# Altium schematic symbol library STM32WL_Sens_ADC_Bat.SCHLIB: 63 symbols
Pins are listed as number, name and electrical type; pins without a type are passive.

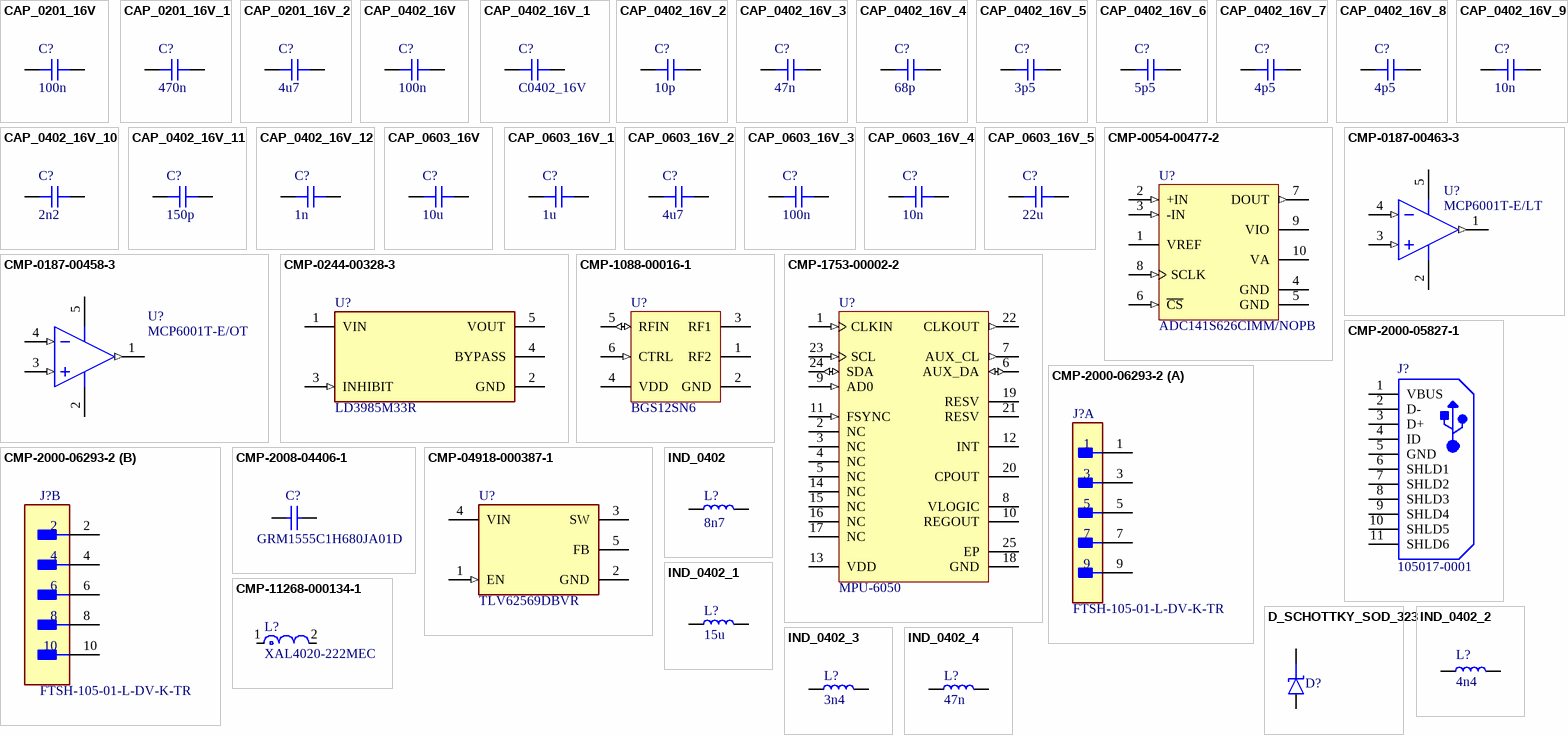
[diagram p0: symbols CAP_0201_16V to IND_0402_4]

## CAP_0201_16V
designator C?, comment 100n
Capacitor SMD 0201 16V
footprint CAP_0201
footprint CAP_0603
pins: 1, 2

## CAP_0201_16V_1
designator C?, comment 470n
Capacitor SMD 0201 16V
footprint CAP_0201
footprint CAP_0603
pins: 1, 2

## CAP_0201_16V_2
designator C?, comment 4u7
Capacitor SMD 0201 16V
footprint CAP_0201
footprint CAP_0603
pins: 1, 2

## CAP_0402_16V
designator C?, comment 100n
Capacitor SMD 0402 16V; Parameter 1: *; Parameter 2: *
footprint CAP_0402
footprint CAP_0603
pins: 1, 2

## CAP_0402_16V_1
designator C?, comment C0402_16V
Capacitor SMD 0402 16V
footprint CAP_0402
pins: 1, 2

## CAP_0402_16V_2
designator C?, comment 10p
Capacitor SMD 0402 16V
footprint CAP_0402
pins: 1, 2

## CAP_0402_16V_3
designator C?, comment 47n
Capacitor SMD 0402 16V
footprint CAP_0402
pins: 1, 2

## CAP_0402_16V_4
designator C?, comment 68p
Capacitor SMD 0402 16V
footprint CAP_0402
pins: 1, 2

## CAP_0402_16V_5
designator C?, comment 3p5
Capacitor SMD 0402 16V
footprint CAP_0402
pins: 1, 2

## CAP_0402_16V_6
designator C?, comment 5p5
Capacitor SMD 0402 16V
footprint CAP_0402
pins: 1, 2

## CAP_0402_16V_7
designator C?, comment 4p5
footprint CAP_0402
pins: 1, 2

## CAP_0402_16V_8
designator C?, comment 4p5
Capacitor SMD 0402 16V
footprint CAP_0402
pins: 1, 2

## CAP_0402_16V_9
designator C?, comment 10n
Capacitor SMD 0402 16V
footprint CAP_0402
pins: 1, 2

## CAP_0402_16V_10
designator C?, comment 2n2
Capacitor SMD 0402 16V
footprint CAP_0402
pins: 1, 2

## CAP_0402_16V_11
designator C?, comment 150p
Capacitor SMD 0402 16V
footprint CAP_0402
pins: 1, 2

## CAP_0402_16V_12
designator C?, comment 1n
Capacitor SMD 0402 16V
footprint CAP_0402
pins: 1, 2

## CAP_0603_16V
designator C?, comment 10u
Capacitor SMD 0603 16V
footprint CAP_0603
pins: 1, 2

## CAP_0603_16V_1
designator C?, comment 1u
Capacitor SMD 0603 16V
footprint CAP_0603
pins: 1, 2

## CAP_0603_16V_2
designator C?, comment 4u7
Capacitor SMD 0603 16V
footprint CAP_0603
pins: 1, 2

## CAP_0603_16V_3
designator C?, comment 100n
Capacitor SMD 0603 16V
footprint CAP_0603
pins: 1, 2

## CAP_0603_16V_4
designator C?, comment 10n
Capacitor SMD 0603 16V
footprint CAP_0603
pins: 1, 2

## CAP_0603_16V_5
designator C?, comment 22u
Capacitor SMD 0603 16V
footprint CAP_0603
pins: 1, 2

## CMP-0054-00477-2
designator U?, comment ADC141S626CIMM/NOPB
14-Bit, 50 kSPS to 250 kSPS, Differential Input, Micro Power A/D Converter, 10-pin Mini SOIC, Pb-Free; Manufacturer: National Semiconductor; CompType: ADC IC; PowerWise: Y; PackageTopMarking: ZXTT*X94C; DatasheetVersion: Jan-2009; PackageVersion: revB, Jul-2003; RoHS: Y; ComponentLink3Description: MUB10A Package Page; ComponentLink2URL: http://www.national.com/pf/AD/ADC141S626.html; Code_JEDEC: MO-187-BA; PackageReference: MUB10A; ComponentLink3URL: http://www.national.com/packaging/folders/mub10a.html; ComponentLink1URL: http://www.national.com/ds/AD/ADC141S626.pdf; PinCount: 10; RevisionNote: Component URLs added; PackageDescription: Mini-SO, Molded, .118 x .118 x .034in Body, 10 Lead, .0197in Pitch; ComponentLink1Description: ADC141S626 Datasheet; ComponentLink2Description: ADC141S626 Web Page
footprint MUB10A_M (TSSOP, 10-Leads, Body 3x3mm, Pitch 0.5mm, IPC Low Density)
footprint MUB10A_N (TSSOP, 10-Leads, Body 3x3mm, Pitch 0.5mm, IPC Medium Density)
footprint MUB10A_L (TSSOP, 10-Leads, Body 3x3mm, Pitch 0.5mm, IPC High Density)
pins: 1 VREF (power), 2 +IN (in), 3 -IN (in), 4 GND (power), 5 GND (power), 6 ~{CS} (in), 7 DOUT (out), 8 SCLK (in), 9 VIO (power), 10 VA (power)

## CMP-0187-00458-3
designator U?, comment MCP6001T-E/OT
None; Output Current: 23mA; Number of Circuits: 1; Input Offset Voltage-Max: 4.5mV; Nominal Supply Current: 100uA; Min Supply Voltage: 1.8V; Voltage: 6V; Operating Supply Voltage: 5.5V; Gain Bandwidth Product: 1MHz; Amplifier Type: GENERAL PURPOSE; Voltage Gain: 112dB; Slew Rate: 0.6V/µs; Power Supply Rejection Ratio (PSRR): 86dB; Input Bias Current: 1pA; Common Mode Rejection Ratio: 60dB; Package Quantity: 3000; Lead Free: Lead Free; Case/Package: SOT-23; Max Operating Temperature: 125°C; RoHS Compliant: Yes; Radiation Hardening: No; Number of Channels: 1; Length: 3.1mm; Height: 1.3mm; Output Current per Channel: 23mA; Supply Current: 100uA; Packaging: Tape and Reel; Technology: CMOS; Number of Elements: 1; Number of Pins: 5; Input Offset Voltage (Vos): 4.5mV; Width: 1.8mm; Contact Plating: Tin; Mount: Surface Mount; Slew Rate-Nom: 0.6V/µs; Unity Gain Bandwidth Product: 1MHz; REACH SVHC: No SVHC; Number of Amplifiers: 1; Max Supply Voltage: 6V; Operating Supply Current: 100uA; Min Operating Temperature: -40°C; Bandwidth: 1MHz
footprint SOT-23-OT5_L (SOT23, 5-Leads, Body 2.9x1.6mm, Pitch 0.95mm, Lead Span 2.7mm, IPC High Density)
simulation model MCP6001
footprint SOT-23-OT5_M (SOT23, 5-Leads, Body 2.9x1.6mm, Pitch 0.95mm, Lead Span 2.7mm, IPC Low Density)
footprint SOT-23-OT5_N (SOT23, 5-Leads, Body 2.9x1.6mm, Pitch 0.95mm, Lead Span 2.7mm, IPC Medium Density)
pins: 1 VOUT (out), 2 VSS (power), 3 VIN+ (in), 4 VIN- (in), 5 VDD (power)

## CMP-0187-00463-3
designator U?, comment MCP6001T-E/LT
None; Unity Gain Bandwidth Product: 1MHz; Output Current: 23mA; Input Offset Voltage-Max: 4.5mV; Supply Current: 100uA; Power Supply Rejection Ratio (PSRR): 86dB; Amplifier Type: GENERAL PURPOSE; Slew Rate: 0.6V/µs; Number of Amplifiers: 1; Min Supply Voltage: 1.8V; Voltage Gain: 112dB; Common Mode Rejection Ratio: 60dB; Input Bias Current: 1pA; Max Supply Voltage: 6V; Operating Supply Voltage: 5.5V; Min Operating Temperature: -40°C; Width: 1.35mm; RoHS Compliant: Yes; Number of Pins: 5; Input Offset Voltage (Vos): 4.5mV; Packaging: Tape and Reel; Lead Free: Lead Free; Nominal Supply Current: 100uA; Technology: CMOS; Contact Plating: Tin; Height: 1mm; Mount: Surface Mount; Radiation Hardening: No; Gain Bandwidth Product: 1MHz; Number of Channels: 1; Bandwidth: 1MHz; Case/Package: SC; REACH SVHC: No SVHC; Number of Circuits: 1; Number of Elements: 1; Package Quantity: 3000; Length: 2.25mm; Slew Rate-Nom: 0.6V/µs; Max Operating Temperature: 125°C
footprint SC70-LT5_L (SOT353, 5-Leads, Body 2x1.3mm, Pitch 0.65mm, Lead Span 2.1mm, IPC High Density)
footprint SC70-LT5_M (SOT353, 5-Leads, Body 2x1.3mm, Pitch 0.65mm, Lead Span 2.1mm, IPC Low Density)
footprint SC70-LT5_N (SOT353, 5-Leads, Body 2x1.3mm, Pitch 0.65mm, Lead Span 2.1mm, IPC Medium Density)
simulation model MCP6001
pins: 1 VOUT (out), 2 VSS (power), 3 VIN+ (in), 4 VIN- (in), 5 VDD (power)

## CMP-0244-00328-3
designator U?, comment LD3985M33R
NexarPartId: 526998; Min Output Voltage: 3.3V; Min Input Voltage: 2.5V; Max Junction Temperature (Tj): 125°C; Min Current Limit: 300mA; Input Bias Current: 85µA; Max Supply Voltage: 6V; Quiescent Current: 150µA; Max Output Current: 150mA; Number of Channels: 1; Output Type: Fixed; Output Voltage Accuracy: 2%; Polarity: Positive; Dropout Voltage: 60mV; Width: 1.75mm; Height: 1.3mm; Lifecycle Status: Production; Case/Package: SOT-23; RoHS: Compliant; Output Current: 150mA; Radiation Hardening: No; Number of Regulators: 1; Max Operating Temperature: 125°C; Output Voltage: 3.3V; Min Supply Voltage: 2.5V; Min Operating Temperature: -40°C; Accuracy: 2%; Number of Outputs: 1; Number of Pins: 5; Packaging: Cut Tape (CT); Lead Free: Lead Free; Schedule B: 8542390000, 8542390000|8542390000, 8542390000|8542390000|8542390000, 8542390000|8542390000|8542390000|8542390000; Mount: Surface Mount; Max Input Voltage: 6V; Length: 3mm
footprint FP-SOT23-5L-7049676-IPC_C
footprint FP-SOT23-5L-7049676-IPC_A
footprint FP-SOT23-5L-7049676-IPC_B
footprint FP-SOT23-5L-7049676-MFG
pins: 1 VIN (power), 2 GND (power), 3 INHIBIT (in), 4 BYPASS, 5 VOUT

## CMP-1088-00016-1
designator U?, comment BGS12SN6
Wideband RF SPDT Switch, 0.1 to 6 GHz, TSNP-6, Reel, Green; Manufacturer: Infineon; Green: TRUE; Supply Voltage Range: 1.8 - 3.5; Packing: Tape and Reel; Isolation @1GHz: 40 dB; Insertion Loss @1GHz: 0.25 dB; Pmax: 30 dBm; ComponentLink2URL: http://www.infineon.com/dgdl/BGS12SN6_2014-05-23.pdf?folderId=db3a30431f848401011fcbf2ab4c04c4&fileId=db3a30433f1b26e8013f2db58bc03856; PackageReference: TSNP-6-2; PartNumber: BGS12SN6; DatasheetVersion: Rev. 1.2; ComponentLink3URL: http://www.infineon.com/dgdl/TSNP-6-2-Package_Overview.pdf?folderId=db3a304327b89750012805e1379a6124&fileId=db3a30433c6612b1013c6bcb02293ba1; ComponentLink2Description: Datasheet; PackageDescription: 6-Pin Thin Small Non Leaded Package, 1.1 x 0.7 mm Body, 0.4 mm Pitch; ComponentLink1URL: http://www.infineon.com/; Frequency ( f ) Range: 0.1 to 6 GHz; Switch Type: SPDT; Mounting Technology: Surface Mount; Halogen-free: TRUE; PackageVersion: Jan-13; ComponentLink3Description: Package Specification; ComponentLink1Description: Manufacturer URL
footprint INF-TSNP-6-2_V (TSNP, 6-Leads, Body 1.1x0.7mm, Pitch 0.4mm)
pins: 1 RF2 "RF Port 2", 2 GND (power) "Ground", 3 RF1 "RF Port 1", 4 VDD (power) "Supply Voltage", 5 RFIN (io) "RF Port In", 6 CTRL (in) "Control Pin"

## CMP-1753-00002-2
designator U?, comment MPU-6050
3-Axis Gyroscope, Accelerometer and a Digital Motion Processor(TM) (DMP), 2.375 to 3.46 V, -40 to 85 degC, 24-Pin QFN, RoHS, Tape and Reel; Manufacturer: InvenSense; Featured Product: MPU-60506-Axis,IntegratedI²CSolution; Other Names: 1428-1007-2 / MPU6050; Sensor Type: MotionTracking; Online Catalog: MPU-6000™Series; Unit PriceUSD: Digital; Datasheet Version: Rev. 3.3, 05/2012; Category: Sensors,Transducers; Datasheet URL: http://datasheet.octopart.com/MPU-6050-InvenSense-datasheet-14421344.pdf; Family: Multifunction; Standard Package: 5,000; Manufacturer URL: http://www.invensense.com/; Output Type: Digital; Dynamic Catalog: MPU-6000™Series
footprint IS-QFN-24_V (QFN, 24-Leads, Body 4x4mm, Pitch 0.5mm, Thermal Pad 2.7x2.6mm)
pins: 1 CLKIN (in) "Optional external reference clock input. Connect to GND if unused.", 2 NC "Not internally connected. May be used for PCB trace routing", 3 NC "Not internally connected. May be used for PCB trace routing", 4 NC "Not internally connected. May be used for PCB trace routing", 5 NC "Not internally connected. May be used for PCB trace routing", 6 AUX_DA (io) "I2C master serial data, for connecting to external sensors", 7 AUX_CL (out) "I2C Master serial clock, for connecting to external sensors", 8 VLOGIC (power) "Digital I/O supply voltage", 9 AD0 (in) "I2C Slave Address LSB (AD0)", 10 REGOUT "Regulator filter capacitor connection", 11 FSYNC (in) "Frame synchronization digital input. Connect to GND if unused.", 12 INT (oc) "Interrupt digital output (totem pole or open-drain)", 13 VDD (power) "Power supply voltage and Digital I/O supply voltage", 14 NC "Not internally connected. May be used for PCB trace routing", 15 NC "Not internally connected. May be used for PCB trace routing", 16 NC "Not internally connected. May be used for PCB trace routing", 17 NC "Not internally connected. May be used for PCB trace routing", 18 GND (power) "Power supply ground", 19 RESV "Reserved. Do not connect", 20 CPOUT "Charge pump capacitor connection", 21 RESV "Reserved. Do not connect", 22 CLKOUT (out) "System clock output", 23 SCL (in) "System clock output  I2C serial clock (SCL)", 24 SDA (io) "I2C serial data (SDA)", 25 EP (power) "Exposed Pad"

## CMP-2000-05827-1
designator J?, comment 105017-0001
Micro-USB B Receptacle, Right Angle, Bottom Mount, Surface Mount, with Solder Tabs, -30 to 85 degC, 5-Pin USB, RoHS, Tape and Reel; Manufacturer: Molex; Featured Product: Micro-USBConnectorsUSBConnectors; Other Names: WM1399DKR; Package Version: Rev. F, 12/2012; Number of Contacts: 5; Connector Type: USB-microB; Catalog Drawings: 1050170001; 3D Model: 105017-0001.stp; Mating Products: WM17145-ND-CABLEMICROUSBBTOSTDA1.0MWM17147-ND-CABLEMICROUSBBTOSTDA2.0MWM17146-ND-CABLEMICROUSBBTOSTDA1.5M; PCN Assembly/Origin: ResinSupplier21/Oct/2015; Voltage - Max: 30V; Online Catalog: Molex-MicroUSB; Manufacturer URL: http://www.molex.com/; Package Description: 5-Leads USB, Micro B, Body 7.5 x 5 mm, Pitch 0.65 mm; Datasheet URL: http://www.molex.com/elqNow/elqRedir.htm?ref=http://www.molex.com/webdocs/datasheets/pdf/en-us/1050170001_IO_CONNECTORS.pdf; Ingress Protection: -; Datasheet Version: 03/2016; Mounting Type: BoardCutout,SurfaceMount,RightAngle; Circuits: 5; Standard Package: 1; Package Reference: MICRO-B; Package URL: http://www.molex.com/pdm_docs/sd/1050170001_sd.pdf; Category: Connectors,Interconnects; Series: -; RoHS Information: 1050170001CertofCompliance; Features: Shielded,SolderRetention; Family: USB,DVI,HDMIConnectors; Specifications: -; Gender: Receptacle; Packaging: Digi-Reel®; Mounting Technology: SurfaceMount
footprint USB-MICRO-B_V (USB, MICRO B, Body 7.491x4.695 mm, Pitch 0.65 mm)
pins: 1 VBUS, 2 D-, 3 D+, 4 ID, 5 GND, 6 SHLD1, 7 SHLD2, 8 SHLD3, 9 SHLD4, 10 SHLD5, 11 SHLD6

## CMP-2000-06293-2
designator J?, comment FTSH-105-01-L-DV-K-TR
CONN HEADER SMD 10POS 1.27MM; Max Current Rating: 1.75A; Number of Contacts: 10; Gender: Male; Row Spacing: 0.05inch; Connector Type: Male Pin; Housing Color: Black; Min Operating Temperature: -55°C; Depth: 3.43mm; Color: Black; Contact Plating: Gold; REACH SVHC: No SVHC; Packaging: Tape and Reel; Current Rating: 1.75A; Radiation Hardening: No; Package Quantity: 550; Number of Positions: 10; Max Operating Temperature: 125°C; Orientation: Straight; Termination: Solder; Contact Mating Length: 0.12inch; Number of Rows: 2; Lead Free: Lead Free; Contact Material: Bronze; Mount: Surface Mount; Housing Material: Polymer; Pitch: 1.27mm; Length: 6.35mm
footprint FP-FTSH-105-01-L-DV-K-TR-MFG
part A pins: 1, 3, 5, 7, 9
part B pins: 2, 4, 6, 8, 10

## CMP-2008-04406-1
designator C?, comment GRM1555C1H680JA01D
Manufacturer: Murata; Part Number: GRM1555C1H680JA01D
footprint CAPC1005X55X25LL05T10 (Chip Capacitor, 2-Leads, Body 1.00x0.50mm, IPC High Density)
footprint CAPC1005X55X25ML05T10 (Chip Capacitor, 2-Leads, Body 1.00x0.50mm, IPC Low Density)
footprint CAPC1005X55X25NL05T10 (Chip Capacitor, 2-Leads, Body 1.00x0.50mm, IPC Medium Density)
pins: 1, 2
1 alternate drawing of the same symbol

## CMP-04918-000387-1
designator U?, comment TLV62569DBVR
IC REG BUCK ADJ 2A SOT23-5; Output Configuration: Positive; Min Output Voltage: 600mV; Max Output Voltage: 5.5V; Switching Frequency: 1.5MHz; Output Type: Adjustable; Synchronous Rectifier: Yes; Min Input Voltage: 2.5V; Output Current: 2A; Mount: Surface Mount; Min Operating Temperature: -40°C; Max Operating Temperature: 125°C; RoHS Compliant: Yes; Max Input Voltage: 5.5V; Case/Package: SOT-23-5; Packaging: Cut Tape
footprint FP-DBV0005A-MFG
footprint FP-DBV0005A-IPC_A
footprint FP-DBV0005A-IPC_B
footprint FP-DBV0005A-IPC_C
pins: 1 EN (in), 2 GND (power), 3 SW (power), 4 VIN (power), 5 FB

## CMP-11268-000134-1
designator L?, comment XAL4020-222MEC
Fixed Inductors 2.2uH Shld 20% 5.5A 38.7mOhms AECQ2; Saturation Current: 5.6A; Core Material: Composite; DC Resistance (DCR): 38.7mR; Self Resonant Frequency: 52MHz; Test Frequency: 100kHz; Shielding: Shielded; Length: 4.3mm; Tolerance: 20%; Packaging: Tape and Reel; Height: 2.1mm; Mount: Surface Mount; Termination: SMD/SMT; Lead Free: Contains Lead; Package Quantity: 1000; Inductance: 2.2uH; Series: XAL4020; Min Operating Temperature: -40°C; Max DC Current: 5.5A; Max Operating Temperature: 125°C; Case/Package: SMD/SMT; Inductance Tolerance: 20%; RMS Current (Irms): 5.5A; Width: 4.3mm; RoHS Compliant: Yes
footprint FP-XAL4020-MFG
pins: 1, 2

## D_SCHOTTKY_SOD_323
designator D?  (value not drawn)
Diode Schottky SMD SOD-323
footprint SOD-323
pins: A, K

## IND_0402
designator L?, comment 8n7
Inductor SMD 0402
footprint IND_0402
pins: 1, 2

## IND_0402_1
designator L?, comment 15u
Inductor SMD 0402
footprint IND_0402
pins: 1, 2

## IND_0402_2
designator L?, comment 4n4
Inductor SMD 0402 LQW15AN4N4G80D
footprint IND_0402
pins: 1, 2

## IND_0402_3
designator L?, comment 3n4
Inductor SMD 0402
footprint IND_0402
pins: 1, 2

## IND_0402_4
designator L?, comment 47n
Inductor SMD 0402
footprint IND_0402
pins: 1, 2

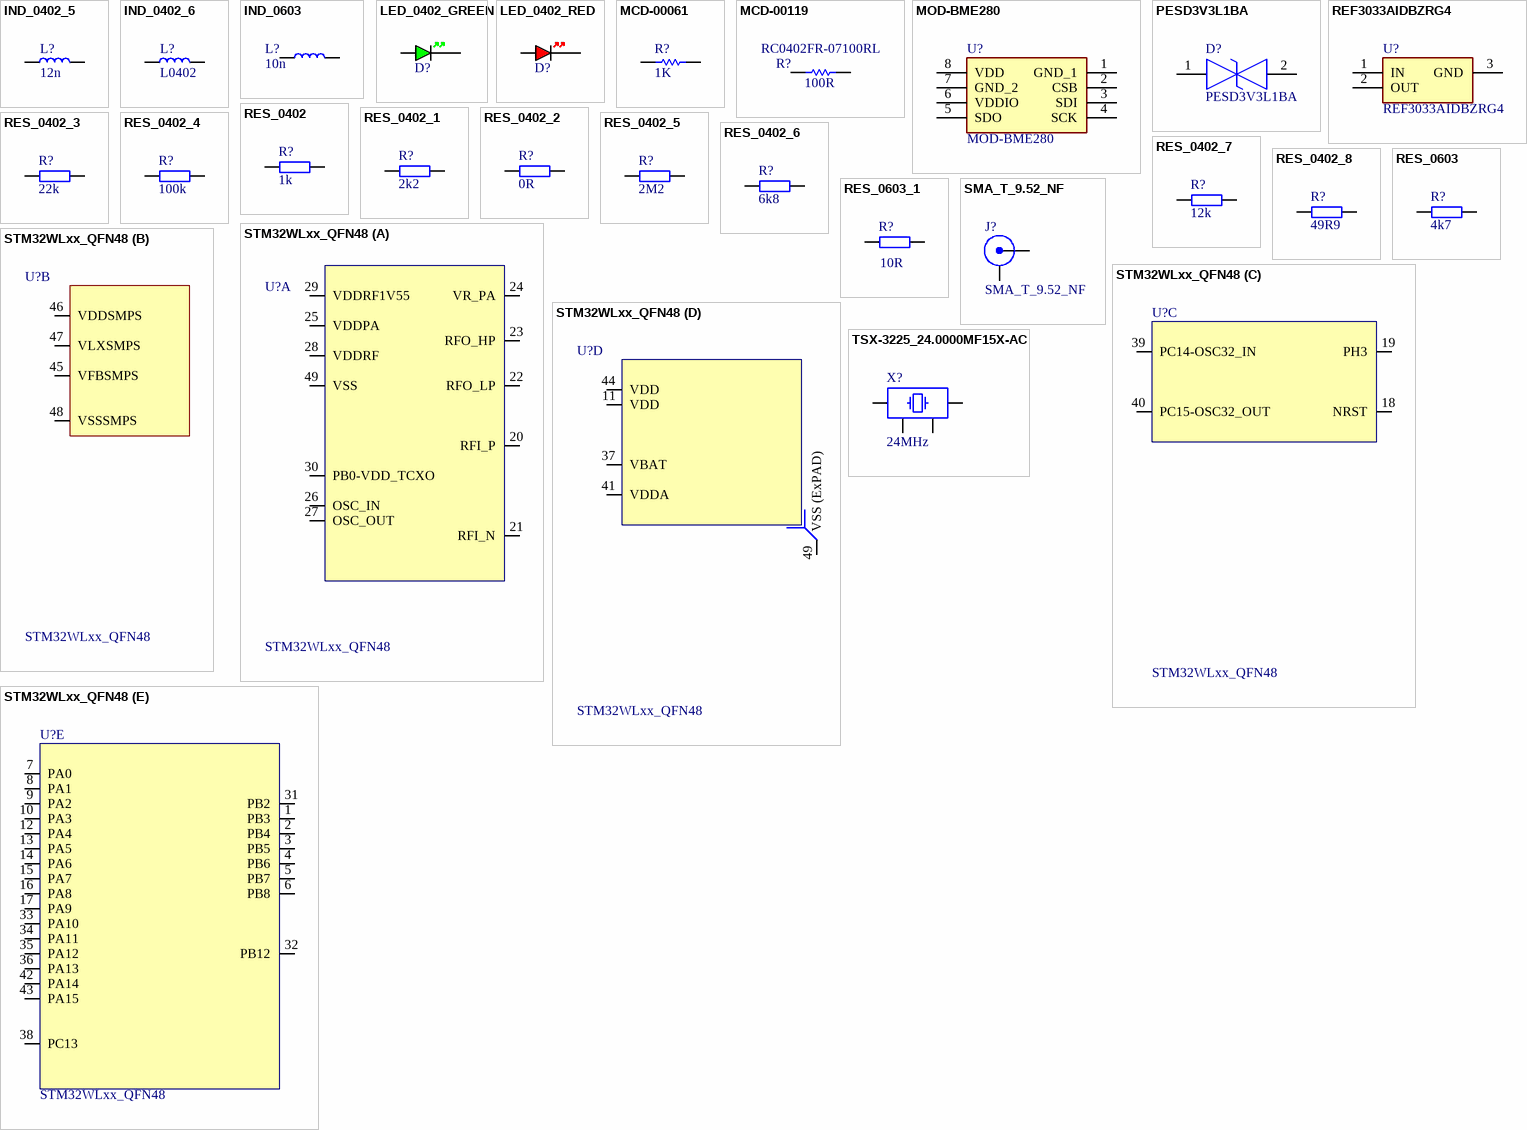
[diagram p1: symbols IND_0402_5 to TSX-3225_24.0000MF15X-AC]

## IND_0402_5
designator L?, comment 12n
Inductor SMD 0402
footprint IND_0402
pins: 1, 2

## IND_0402_6
designator L?, comment L0402
Inductor SMD 0402
footprint IND_0402
pins: 1, 2

## IND_0603
designator L?, comment 10n
Inductor SMD 0603
footprint IND_0603
pins: 1, 2

## LED_0402_GREEN
designator D?, comment GREEN  (value not drawn)
LED 0402 GREEN SMD
footprint LED_0402_GREEN
pins: A, K

## LED_0402_RED
designator D?, comment RED  (value not drawn)
LED 0402 RED SMD
footprint LED_0402_RED
pins: A, K

## MCD-00061
designator R?  value 1K
Resistor,1K,0402,1%,1/16W; Internal_Part_Number: MCD-00061; Manufacturer_Part_Number: RC0402FR-071KL; Manufacturer: YAGEO; Provided_By: SUBCO; ECCN_US: EAR99; ECCN_EU: NEC; Status: Released; Part_Type: Resistor; Package: R0402; ComponentLink1Description: Datasheet; ComponentLink1URL: http://tunmcdsvn.tun.st.com/Component_Datasheet_Library/Trunk/Resistors/Yageo_Resistor_RC0402-series
footprint R0402
footprint RES_0603
pins: 1, 2

## MCD-00119
designator R?  value 100R  Manufacturer_Part_Number: RC0402FR-07100RL
Resistor,100R,0402,1%,1/16W; Internal_Part_Number: MCD-00119; Manufacturer: YAGEO; Provided_By: SUBCO; ECCN_US: EAR99; ECCN_EU: NEC; Status: Released; Part_Type: Resistor; Package: R0402; ComponentLink1Description: Datasheet; ComponentLink1URL: http://tunmcdsvn.tun.st.com/Component_Datasheet_Library/Trunk/Resistors/Yageo_Resistor_RC0402-series
footprint R0402
pins: 1, 2

## MOD-BME280
designator U?
Integrated Circuit; Manufacturer_Name: Olimex Ltd.; Datasheet Link: https://eu.mouser.com/datasheet/2/306/BME280-1620794.pdf; Height: 1mm; Manufacturer_Part_Number: MOD-BME280; Mouser Part Number: 909-MOD-BME280; Mouser Price/Stock: https://www.mouser.co.uk/ProductDetail/Olimex-Ltd/MOD-BME280?qs=%252B6g0mu59x7K82sEO3yPPgg%3D%3D
footprint MODBME280
pins: 1 GND_1, 2 CSB, 3 SDI, 4 SCK, 5 SDO, 6 VDDIO, 7 GND_2, 8 VDD

## PESD3V3L1BA
designator D?
TVS Diode (Bi-directional); Manufacturer_Name: Nexperia; Datasheet Link: https://datasheet.datasheetarchive.com/originals/distributors/Datasheets-26/DSA-502681.pdf; Height: 1.1mm; Manufacturer_Part_Number: PESD3V3L1BA; Mouser Part Number: N/A; Mouser Price/Stock: https://www.mouser.co.uk/ProductDetail/Nexperia/PESD3V3L1BA?qs=vHuUswq2%252BswBNSPO0jzUyg%3D%3D
footprint SOD2512X110N
pins: 1, 2

## REF3033AIDBZRG4
designator U?
Integrated Circuit; Manufacturer_Name: Texas Instruments; Datasheet Link: https://www.ti.com/lit/ds/symlink/ref3030.pdf?ts=1639296719724; Height: 1.12mm; Manufacturer_Part_Number: REF3033AIDBZRG4; Mouser Part Number: 595-REF3033AIDBZRG4; Mouser Price/Stock: https://www.mouser.co.uk/ProductDetail/Texas-Instruments/REF3033AIDBZRG4?qs=sSOk4GDDv7x3KhdEagQjiQ%3D%3D; Arrow Part Number: REF3033AIDBZRG4; Arrow Price/Stock: https://www.arrow.com/en/products/ref3033aidbzrg4/texas-instruments
footprint SOT95P237X112-3N
pins: 1 IN, 2 OUT, 3 GND

## RES_0402
designator R?, comment 1k
Resistor SMD 0402
footprint RES_0402
pins: 1, 2

## RES_0402_1
designator R?, comment 2k2
Resistor SMD 0402
footprint RES_0402
pins: 1, 2

## RES_0402_2
designator R?, comment 0R
Resistor SMD 0402
footprint RES_0402
pins: 1, 2

## RES_0402_3
designator R?, comment 22k
Resistor SMD 0402
footprint RES_0402
pins: 1, 2

## RES_0402_4
designator R?, comment 100k
Resistor SMD 0402
footprint RES_0402
pins: 1, 2

## RES_0402_5
designator R?, comment 2M2
Resistor SMD 0402
footprint RES_0402
pins: 1, 2

## RES_0402_6
designator R?, comment 6k8
Resistor SMD 0402
footprint RES_0402
pins: 1, 2

## RES_0402_7
designator R?, comment 12k
Resistor SMD 0402
footprint RES_0402
pins: 1, 2

## RES_0402_8
designator R?, comment 49R9
Resistor SMD 0402
footprint RES_0402
pins: 1, 2

## RES_0603
designator R?, comment 4k7
Resistor SMD 0603
footprint RES_0603
pins: 1, 2

## RES_0603_1
designator R?, comment 10R
Resistor SMD 0603
footprint RES_0603
pins: 1, 2

## SMA_T_9.52_NF
designator J?
SMA End Launch Jack 1.0 mm Board, 50 ohm; Manufacturer: COAX CONNECTORS LTD; Manufacturer_Part_Number: 30-462-D3-1.1mm
footprint CO_SAMTEC_SMA-J-P-ST-EMI (SMA Jack CMS, Edge Mountt Receptacle 50Ohm, 5-Leads, Body 6.35x6.35x9.52mm, pitch 2.825mm)
pins: 1 X, 2 Y

## STM32WLxx_QFN48
designator U?
HQDC : Verified April, 25 2019; Manufacturer: STMicroelectronics; Manufacturer_Part_Number: STM32WLE5CC
footprint STM32WLxx_QFN48 (QFN48 7x7x0.55mm pitch 0.5mm)
part A pins: 20 RFI_P, 21 RFI_N, 22 RFO_LP, 23 RFO_HP, 24 VR_PA, 25 VDDPA, 26 OSC_IN, 27 OSC_OUT, 28 VDDRF, 29 VDDRF1V55, 30 PB0-VDD_TCXO, 49 VSS
part B pins: 45 VFBSMPS, 46 VDDSMPS, 47 VLXSMPS, 48 VSSSMPS
part C pins: 18 NRST, 19 PH3, 39 PC14-OSC32_IN, 40 PC15-OSC32_OUT
part D pins: 11 VDD, 37 VBAT, 41 VDDA, 44 VDD, 49 VSS (ExPAD)
part E pins: 1 PB3, 2 PB4, 3 PB5, 4 PB6, 5 PB7, 6 PB8, 7 PA0, 8 PA1, 9 PA2, 10 PA3, 12 PA4, 13 PA5, 14 PA6, 15 PA7, 16 PA8, 17 PA9, 31 PB2, 32 PB12, 33 PA10, 34 PA11, 35 PA12, 36 PA13, 38 PC13, 42 PA14, 43 PA15

## TSX-3225_24.0000MF15X-AC
designator X?, comment 24MHz
Crystal SMD 24MHz 10PPM 7pF 3225; Manufacturer: Epson; Manufacturer Number: TSX-3225 24.0000MF15X-AC; ESR: 40R; Value: 24MHz; Type: XTAL; Load Capacitance: 7pF
footprint XTAL_3225
pins: 1, 2, 3, 4